# EAGLE library part TRANSISTOR-MOSFET-P-SO-8 (library dp_devices.v6)
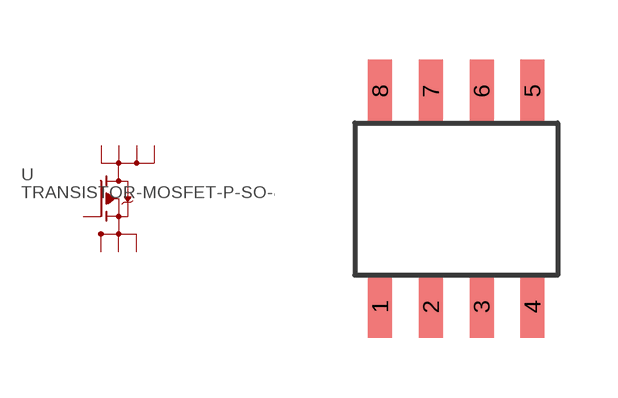
[diagram p166: symbol with the pads of SO-8; footprint SO-8]

Designator prefix -

## TRANSISTOR-MOSFET-P-SO-8  [SO-8]
1  S  pas
2  S1  pas
3  S2  pas
4  G  pas
5  D  pas
6  D1  pas
7  D2  pas
8  D3  pas

## Footprint SO-8 (pad centres in mm)
smd 0.6 x 1.55: 1 -1.905,-2.69; 2 -0.635,-2.69; 3 0.635,-2.69; 4 1.905,-2.69; 5 1.905,2.71; 6 0.635,2.71; 7 -0.635,2.71; 8 -1.905,2.71